# Altium schematic symbol library CL32A476KOJNNNE.SchLib: 1 symbol
Pins are listed as number, name and electrical type; pins without a type are passive.

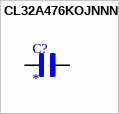
[diagram p0: symbol CL32A476KOJNNNE]

## CL32A476KOJNNNE
designator C?
MF: {'manufacturer': u'Samsung Electro-Mechanics'}; MP: CL32A476KOJNNNE; Package: None; Price: None; Value: *; Availability: Unavailable
footprint CAPC3225X270N
pins: 1, 2